# Altium footprint library LCD.PcbLib: 34 footprints (part 3 of 3)
Each footprint in its own frame and in the unit in brackets; x right, y up, seen from the top. Pads: shape width x height; smd on the part's side, far side on the other; paste and mask are expansions set on the pad; w line width, h text height; cw(c..) or ccw(c..) is an arc to the next point about the centre after c.
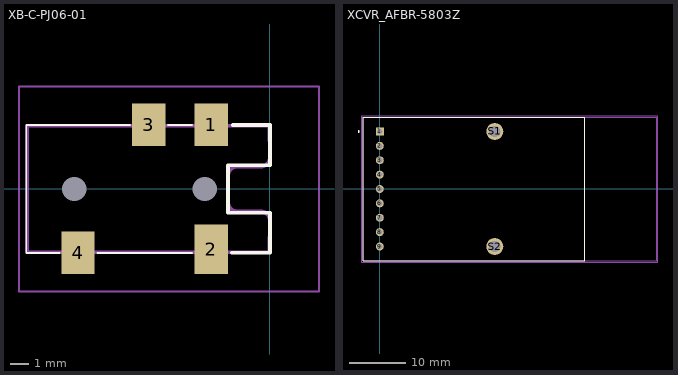
[diagram p2: the footprints below, top view; thin cyan lines are the x and y axes]

## XB-C-PJ06-01 [mm] "XB-C-PJ06-01"
pads (6):
  rect 1.79x2.28 smd: 1(-3.15,3.44) 3(-6.5,3.44) 4(-10.3,-3.43)
  rect 1.79x2.67 smd: 2(-3.15,-3.235)
  round 0.5 hole 1.3 unplated: MH1(-3.5,0) MH2(-10.5,0)
Top Overlay:
  lines w0.1: -11.303,-3.429 -13.081,-3.429 -13.081,3.429 -7.493,3.429 ; -9.271,-3.429 -4.191,-3.429 ; -5.461,3.429 -4.191,3.429
  lines w0.2: -2.032,-3.429 0,-3.429 0,-1.27 -2.25,-1.27 -2.25,1.27 0,1.27 0,3.429 -2,3.429
Mechanical 13:
  lines w0.2: -13.028,-3.4 -0.028,-3.4 0,-1.7 ccw(c-0.5,-1.7) -0.5,-1.2 -1.75,-1.2 cw(c-1.75,-0.7) -2.25,-0.7 -2.25,0 -2.25,0.7 cw(c-1.75,0.7) -1.75,1.2 -0.5,1.2 ccw(c-0.5,1.7) 0,1.7 -0.028,3.4 -13.028,3.4 ; -13.028,-3.398 -13.028,0.002 ; -13.028,-0.002 -13.028,3.398
Mechanical 15:
  lines w0.1: -13.467,-5.501 2.633,-5.501 2.633,5.499 -13.467,5.499 -13.467,-5.501
3D body "xb-c-pj06-01.stp": height 4.55, standoff -0.65, extent -12.977,-4.194 0.023,4.191

## XCVR_AFBR-5803Z [mm]
pads (11):
  rect 1.408x1.408 hole 0.9: 1(0,10.16)
  round 1.408 hole 0.9: 2(0,7.62) 3(0,5.08) 4(0,2.54) 5(0,0) 6(0,-2.54) 7(0,-5.08) 8(0,-7.62) 9(0,-10.16)
  round 3 hole 2: S1(20.32,10.16) S2(20.32,-10.16)
Top Overlay:
  circle w0.2: c-3.75,10.16 r0.1
  lines w0.127: -2.92,-12.7 -2.92,12.7 36.2,12.7 36.2,-12.7 -2.92,-12.7
Mechanical 13:
  circle w0.2: c-3.75,10.16 r0.1
  lines w0.127: 36.2,-12.7 -2.92,-12.7 -2.92,12.7 36.2,12.7 ; 36.2,-12.7 36.2,12.7 ; 36.2,-12.7 48.9,-12.7 48.9,12.7 36.2,12.7
Mechanical 15:
  lines w0.05: -3.17,-12.95 49.15,-12.95 49.15,12.95 -3.17,12.95 -3.17,-12.95
3D body "AFBR-5803Z.STEP": height 11.18, standoff -3.7, extent -2.921,-12.7 36.199,12.7